# Altium schematic symbol library MIMXRT1011DAE5A.SchLib: 1 symbol
Pins are listed as number, name and electrical type; pins without a type are passive.

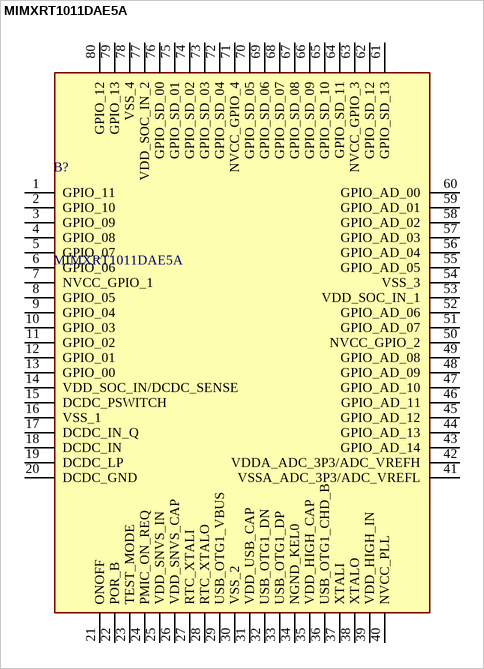
[diagram p0: symbol MIMXRT1011DAE5A]

## MIMXRT1011DAE5A
designator B?
ARM Microcontrollers - MCU i.MX RT1010 Crossover MCU with Arm<sup> </sup> Cortex<sup> </sup>-M7 core; Manufacturer_Name: NXP; Geometry.Height: 1.6mm; Manufacturer_Part_Number: MIMXRT1011DAE5A; Mouser Part Number: 771-MIMXRT1011DAE5A; Mouser Price/Stock: https://www.mouser.co.uk/ProductDetail/NXP-Semiconductors/MIMXRT1011DAE5A?qs=P1JMDcb91o5GoeF%252BJrcvqQ%3D%3D; Arrow Part Number: MIMXRT1011DAE5A; Arrow Price/Stock: https://www.arrow.com/en/products/mimxrt1011dae5a/nxp-semiconductors?region=nac; Datasheet Link: http://www.nxp.com/docs/en/data-sheet/IMXRT1010CEC.pdf
footprint QFP50P1400X1400X160-80N
pins: 1 GPIO_11, 2 GPIO_10, 3 GPIO_09, 4 GPIO_08, 5 GPIO_07, 6 GPIO_06, 7 NVCC_GPIO_1, 8 GPIO_05, 9 GPIO_04, 10 GPIO_03, 11 GPIO_02, 12 GPIO_01, 13 GPIO_00, 14 VDD_SOC_IN/DCDC_SENSE, 15 DCDC_PSWITCH, 16 VSS_1, 17 DCDC_IN_Q, 18 DCDC_IN, 19 DCDC_LP, 20 DCDC_GND, 21 ONOFF, 22 POR_B, 23 TEST_MODE, 24 PMIC_ON_REQ, 25 VDD_SNVS_IN, 26 VDD_SNVS_CAP, 27 RTC_XTALI, 28 RTC_XTALO, 29 USB_OTG1_VBUS, 30 VSS_2, 31 VDD_USB_CAP, 32 USB_OTG1_DN, 33 USB_OTG1_DP, 34 NGND_KEL0, 35 VDD_HIGH_CAP, 36 USB_OTG1_CHD_B, 37 XTALI, 38 XTALO, 39 VDD_HIGH_IN, 40 NVCC_PLL, 41 VSSA_ADC_3P3/ADC_VREFL, 42 VDDA_ADC_3P3/ADC_VREFH, 43 GPIO_AD_14, 44 GPIO_AD_13, 45 GPIO_AD_12, 46 GPIO_AD_11, 47 GPIO_AD_10, 48 GPIO_AD_09, 49 GPIO_AD_08, 50 NVCC_GPIO_2, 51 GPIO_AD_07, 52 GPIO_AD_06, 53 VDD_SOC_IN_1, 54 VSS_3, 55 GPIO_AD_05, 56 GPIO_AD_04, 57 GPIO_AD_03, 58 GPIO_AD_02, 59 GPIO_AD_01, 60 GPIO_AD_00, 61 GPIO_SD_13, 62 GPIO_SD_12, 63 NVCC_GPIO_3, 64 GPIO_SD_11, 65 GPIO_SD_10, 66 GPIO_SD_09, 67 GPIO_SD_08, 68 GPIO_SD_07, 69 GPIO_SD_06, 70 GPIO_SD_05, 71 NVCC_GPIO_4, 72 GPIO_SD_04, 73 GPIO_SD_03, 74 GPIO_SD_02, 75 GPIO_SD_01, 76 GPIO_SD_00, 77 VDD_SOC_IN_2, 78 VSS_4, 79 GPIO_13, 80 GPIO_12